# Altium schematic symbol library PCB_Project1.SCHLIB: 51 symbols (part 2 of 2)
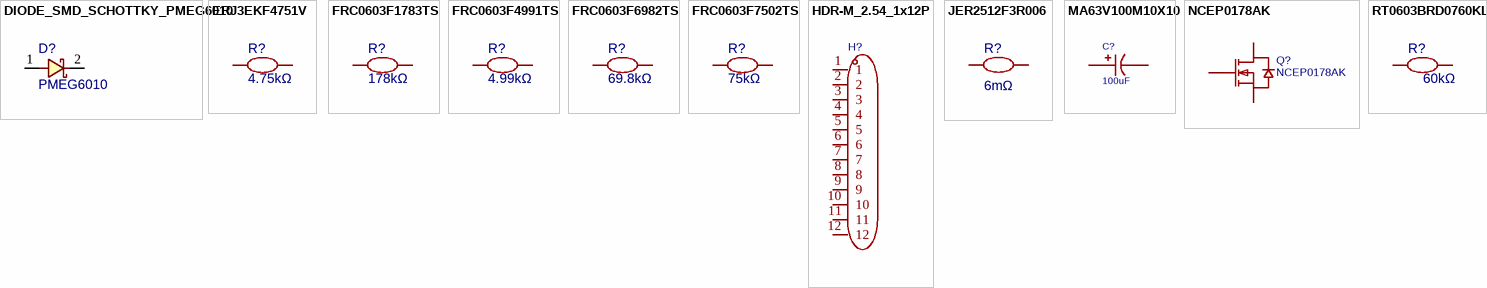
[diagram p2: symbols DIODE_SMD_SCHOTTKY_PMEG6010 to RT0603BRD0760KL]

## FRC0603F6982TS
designator R?, comment 69.8kΩ
电阻类型:厚膜电阻;阻值:69.8kΩ;精度:±1%;功率:100mW;工作电压:75V;温度系数:±100ppm/℃;; Manufacturer: FOJAN(富捷); Symbol: FRC0603F6982TS; Add into BOM: yes; 3D Model: fc143cca1e79419f9cd78b61e9279f08; 3D Model Transform: 31.8897,63.7794,0,90,0,0,0,0,0; Tolerance: ±1%; Power(Watts): 100mW; Voltage-Supply(Max): 75V; ModelName: R0603; Device: FRC0603F6982TS; Convert to PCB: yes; Value: 69.8kΩ; LCSC Part Name: 69.8kΩ ±1% 100mW 厚膜电阻; Supplier Part: C2930012; Manufacturer Part: FRC0603F6982TS; Supplier Footprint: 0603; JLCPCB Part Class: Extended Part; Datasheet: https://item.szlcsc.com/datasheet/FRC0603F6982TS/3266945.html; Supplier: LCSC; Type: 厚膜电阻; Temperature Coefficient: ±100ppm/℃; Operating Temperature: -55℃~+155℃; FootprintName: R0603
3D model R0603
footprint R0603D (CHIP Resistor 1/10 WATT, 1.6x0.8mm, 0603, SMD (SolderMask Defined))
pins: 1, 2

## FRC0603F7502TS
designator R?, comment 75kΩ
电阻类型:厚膜电阻;阻值:75kΩ;精度:±1%;功率:100mW;工作电压:75V;温度系数:±100ppm/℃;; Manufacturer: FOJAN(富捷); Symbol: FRC0603F7502TS; Add into BOM: yes; 3D Model: fc143cca1e79419f9cd78b61e9279f08; 3D Model Transform: 31.8897,63.7794,0,90,0,0,0,0,0; Tolerance: ±1%; Power(Watts): 100mW; Voltage-Supply(Max): 75V; ModelName: R0603; Device: FRC0603F7502TS; Convert to PCB: yes; Value: 75kΩ; LCSC Part Name: 75kΩ ±1% 100mW 厚膜电阻; Supplier Part: C2907067; Manufacturer Part: FRC0603F7502TS; Supplier Footprint: 0603; JLCPCB Part Class: Extended Part; Supplier: LCSC; Type: 厚膜电阻; Temperature Coefficient: ±100ppm/℃; Operating Temperature: -55℃~+155℃; FootprintName: R0603
3D model R0603
footprint R0603D (CHIP Resistor 1/10 WATT, 1.6x0.8mm, 0603, SMD (SolderMask Defined))
pins: 1, 2

## HDR-M_2.54_1x12P
designator H?
间距:2.54mm;总PIN位数:12;排数:1;插针结构:1x12P;行距:-;安装类型:直插;圆针/方针:方针;额定电流:3A;额定电压:250V;配合针长度:6mm;塑高:2.5mm;端接针长度:3mm;触头材质:-;工作温度范围:-40℃~+105℃;颜色:黑色;; Symbol: HDR_2.54-1x12P; Device: HDR-M_2.54_1x12P; ConvertToPcb: yes; ModelId: 3dba4cf9b1d14f4b93786901a7682825聨0819f05c4eef4c71ace90d822a990e87; ModelName: HDR2.54-M-LI-1X12P; ModelTransform: 1199.998,100,0,0,0,0,0,0,-118.11; AddInBom: yes; SupplierPart: C2840012; Supplier Footprint: 插件; FootprintName: HDR-TH_12P-P2.54-V-M
footprint HDR_F_1X12 (Connector; Header; 12 Position)
pins: 1, 2, 3, 4, 5, 6, 7, 8, 9, 10, 11, 12

## JER2512F3R006
designator R?, comment 6mΩ
电阻类型:采样电阻；合金电阻;阻值:6mΩ;精度:±1%;功率:3W;温度系数:±50ppm/℃;安装方式:贴片;; Manufacturer: JIERR(捷而瑞); Symbol: JER2512F3R006; Add into BOM: yes; 3D Model: 3c946b39f1b547de9af067cb1ede82cc; 3D Model Transform: 252.7554,126.7714,0,0,0,0,0,0,0; Tolerance: ±1%; Power(Watts): 3W; ModelName: RES-SMD_L6.4-W3.2-R2512; Device: JER2512F3R006; Convert to PCB: yes; Value: 6mΩ; LCSC Part Name: 6mΩ 3W 2512 ±1%; Supplier Part: C46634449; Manufacturer Part: JER2512F3R006; Supplier Footprint: 2512; JLCPCB Part Class: Extended Part; Datasheet: https://item.szlcsc.com/datasheet/JER2512F3R006/48788251.html; Supplier: LCSC; Type: 采样电阻；合金电阻; Temperature Coefficient: ±50ppm/℃; Mounting Type: 贴片; FootprintName: RES-SMD_L6.4-W3.2-R2512
footprint R2512 (CHIP RESISTOR 1 WATT, 6.4X3.2mm, 2512, 6432)
3D model RES-SMD_L6.4-W3.2-R2512
pins: 1, 2

## MA63V100M10X10
designator C?, comment 100uF
容值:100uF;精度:±20%;额定电压:63V;纹波电流:3.1A@100kHz;等效串联电阻(ESR):30mΩ@100kHz;类型:聚合物;; Manufacturer: JIERR(捷而瑞); Symbol: MA63V100M10X10; AddInBom: yes; Tolerance: ±20%; Voltage Rating: 63V; Type: 聚合物; Lifetime: 2000hrs@105℃; Polarity type: 有极性; Device: MA63V100M10X10; LCSC Part Name: 100uF ±20% 63V; SupplierPart: C54321630; ManufacturerPart: MA63V100M10X10; Supplier Footprint: SMD,D10.3xL10.5mm; JLCPCB Part Class: Extended Part; Datasheet: https://item.szlcsc.com/datasheet/MA63V100M10X10/57612373.html; Supplier: LCSC; ConvertToPcb: yes; FootprintName: CAP-SMD_BD10.0-L10.3-W10.3-LS11.6-FD_H10.5; Value: 100uF; Ripple Current: 3.1A@100kHz; Equivalent Series Resistance(ESR): 30mΩ@100kHz; Diameter: 10mm; Height - Seated (Max): 10mm; Operating Temperature: -55℃~+105℃
footprint C_EL_D10L10 (Electrolytic Cap, 10.3mm, L: 10.2mm, size G)
pins: 1, 2

## NCEP0178AK
designator Q?
数量:1个N沟道;漏源电压(Vdss):100V;连续漏极电流(Id):78A;导通电阻(RDS(on)):12mΩ@4.5V;耗散功率(Pd):125W;阈值电压(Vgs(th)):2.2V;; Manufacturer: NCE(无锡新洁能); AddInBom: yes; ModelId: 6b2ea0154a284e6db98f69bccdba3606聨0819f05c4eef4c71ace90d822a990e87; ModelName: TO-252-2_L6.5-W6.1-H2.3-LS10.0-P4.58; ModelTransform: 255.905,390.52442,0,270,0,0,38.183,0.432,0; Number: 1个N沟道; Drain to Source Voltage: 100V; Current - Continuous Drain(Id): 78A; Pd - Power Dissipation: 125W; Gate Threshold Voltage (Vgs(th)): 2.2V; Gate Charge(Qg): 65nC@10V; Input Capacitance(Ciss): 5.48nF; Reverse Transfer Capacitance (Crss@Vds): 30pF; Type: N沟道; Output Capacitance(Coss): 425pF; Vgs: ±20V; Symbol: NCEP0178AK; Device: NCEP0178AK; LCSC Part Name: 1个N沟道 耐压:100V 电流:78A; SupplierPart: C216784; ManufacturerPart: NCEP0178AK; Supplier Footprint: TO-252-2L; JLCPCB Part Class: Extended Part; Datasheet: https://item.szlcsc.com/datasheet/NCEP0178AK/217675.html; Supplier: LCSC; ConvertToPcb: yes; FootprintName: TO-252-2_L6.5-W6.1-P4.58-LS10.0-TL; RDS(on): 12mΩ@4.5V; Operating Temperature: -55℃~+175℃; Configuration: -
footprint DPAK_3 (D-PAK (TO-252), 3-Pads, Body 6.2x6.7mm)
pins: 1 G, 3 S, 4 D

## RT0603BRD0760KL
designator R?, comment 60kΩ
电阻类型:薄膜电阻;阻值:60kΩ;精度:±0.1%;功率:100mW;工作电压:75V;温度系数:±25ppm/℃;; Manufacturer: YAGEO(国巨); Symbol: RT0603BRD0760KL; Add into BOM: yes; 3D Model: 23cb0422d2aa44048b6e6e3bc21a96b9; 3D Model Transform: 61.024,33.504,0,0,0,0,0,0,0; Tolerance: ±0.1%; Power(Watts): 100mW; Voltage-Supply(Max): 75V; ModelName: RES-SMD_L1.55-W0.85; Device: RT0603BRD0760KL; Convert to PCB: yes; Value: 60kΩ; LCSC Part Name: 薄膜电阻 60kΩ ±0.1% 100mW; Supplier Part: C6460576; Manufacturer Part: RT0603BRD0760KL; Supplier Footprint: 0603; JLCPCB Part Class: Extended Part; Datasheet: https://item.szlcsc.com/datasheet/RT0603BRD0760KL/7413753.html; Supplier: LCSC; Type: 薄膜电阻; Temperature Coefficient: ±25ppm/℃; Operating Temperature: -55℃~+155℃; FootprintName: RES-SMD_L1.55-W0.85
footprint R0603D (CHIP Resistor 1/10 WATT, 1.6x0.8mm, 0603, SMD (SolderMask Defined))
3D model RES-SMD_L1.55-W0.85
pins: 1, 2